# Altium schematic symbol library ESDBW5V0A1_C5173252.SCHLIB: 1 symbol
Pins are listed as number, name and electrical type; pins without a type are passive.

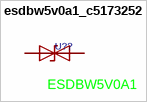
[diagram p0: symbol esdbw5v0a1_c5173252]

## esdbw5v0a1_c5173252
designator U??, comment ESDBW5V0A1
Reverse Stand-Off Voltage (Vrwm):5V Clamping Voltage:12V Peak Pulse Power Dissipation (Ppp):360W@8/20us Voltage - Breakdown:7.2V Reverse Leakage Current (Ir):100nA Number of Channels:1 Operating Temperature:-55℃~+125℃ Operating Temperature:-55℃~+125℃ leve; Manufacturer: Leiditech(雷卯电子); Symbol: ESDBW5V0A1_C5173252; AddInBom: yes; ModelId: ea1bcde2100540c7b34b3a1c7df79444; ModelName: X1-DFN1006-2_L1.0-W0.6-P0.65-BI; ModelTransform: 39.37,23.622,0,0,0,0,0,0,0; Reverse Stand-Off Voltage (Vrwm): 5V; Clamping Voltage: 12V; Voltage - Breakdown: 7.2V; Reverse Leakage Current (Ir): 100nA; Number of Channels: 1; level of protection: IEC 61000-4-4；IEC 61000-4-5；IEC 61000-4-2; Junction Capacitance: 60pF; Supplier: LCSC; Supplier Part: C5173252; Manufacturer Part: ESDBW5V0A1; JLCPCB Part Class: Extended Part; LCSC Part Name: ESD 5V截止; Supplier Footprint: DFN1006-2; Datasheet: https://item.szlcsc.com/datasheet/ESDBW5V0A1/5822823.html; ConvertToPcb: yes; FootprintName: X1-DFN1006-2_L1.0-W0.6-P0.65-BI; Peak Pulse Power Dissipation (Ppp): 360W@8/20us; Operating Temperature: -55℃~+125℃; Type: ESD
footprint X1-DFN1006-2_L1.0-W0.6-P0.65-BI
pins: 1 K, 2 A